# Altium footprint library Connector_SMD.PcbLib: 116 footprints (part 4 of 8)
Each footprint in its own frame and in the unit in brackets; x right, y up, seen from the top. Pads: shape width x height; smd on the part's side, far side on the other; paste and mask are expansions set on the pad; w line width, h text height; cw(c..) or ccw(c..) is an arc to the next point about the centre after c.
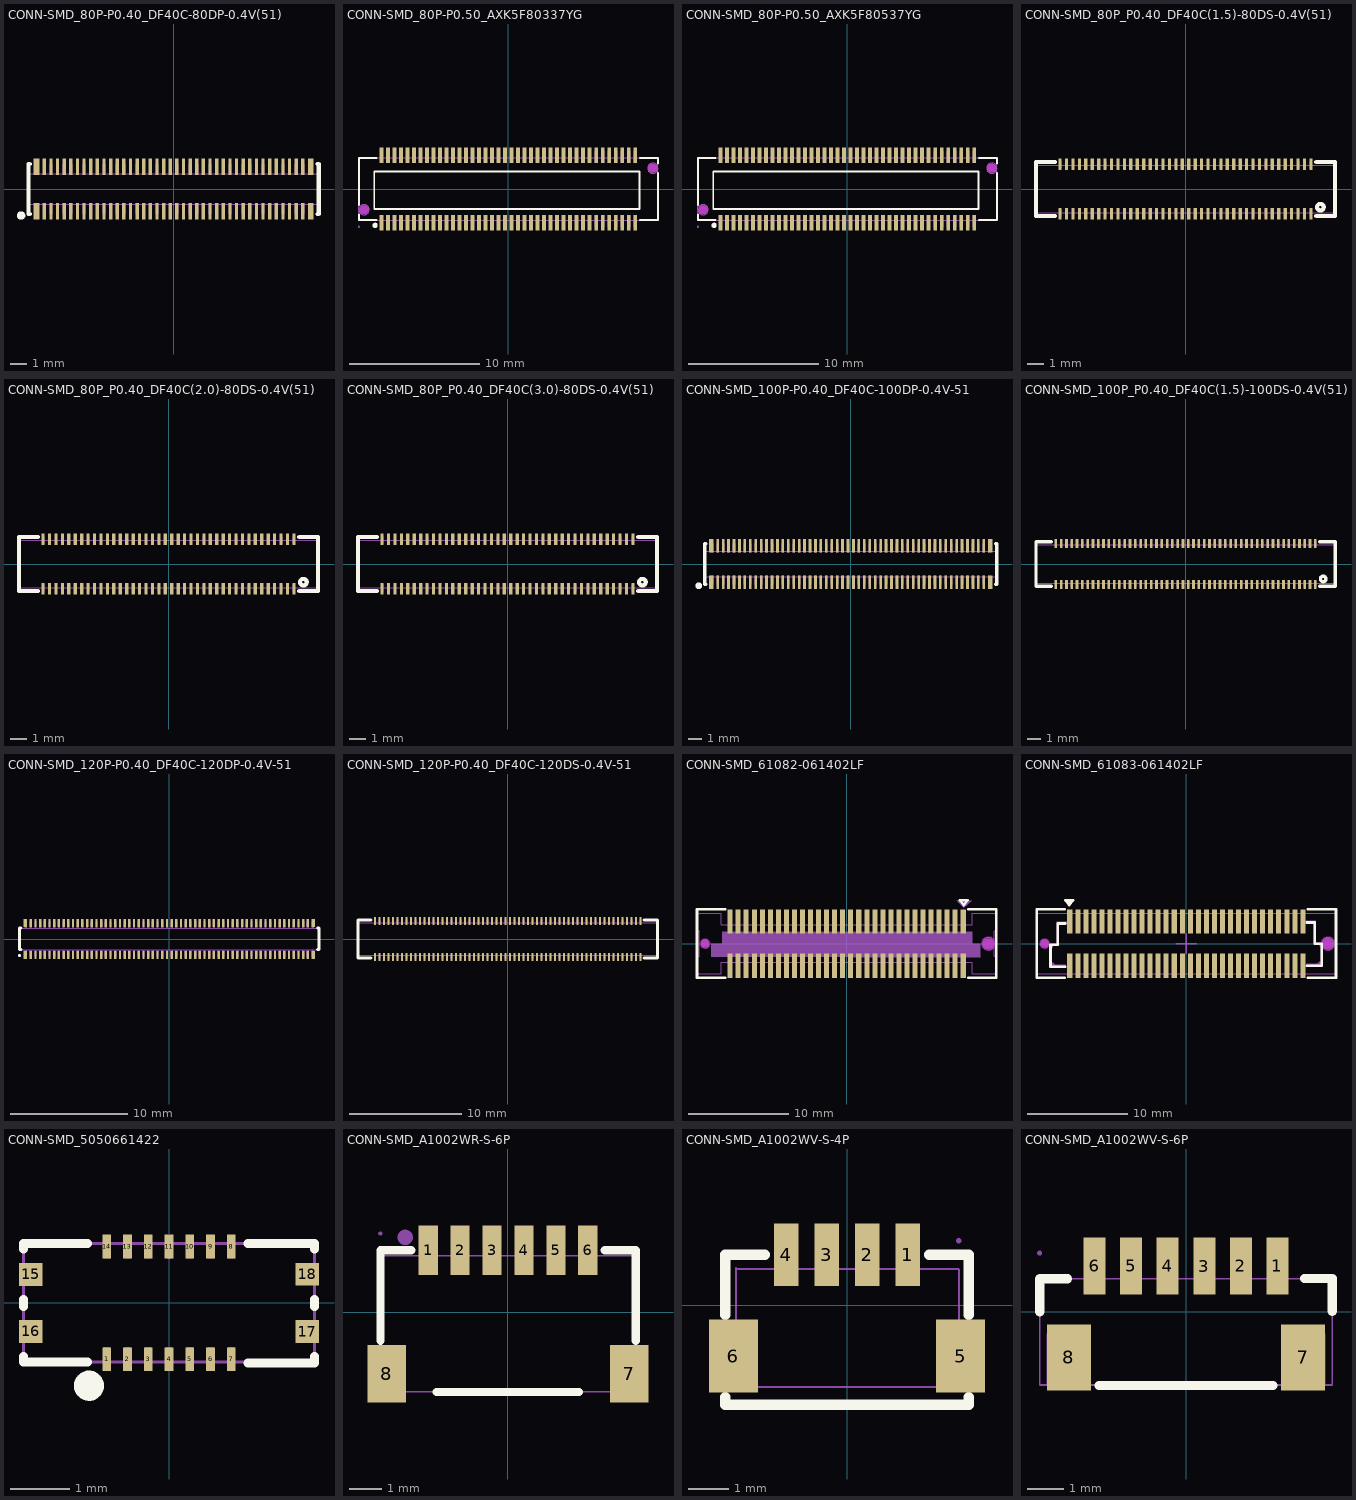
[diagram p3: the footprints below, top view; thin cyan lines are the x and y axes]

## CONN-SMD_80P-P0.40_DF40C-80DP-0.4V(51) [mm]
pads (84):
  rect 0.2x1 smd: 1(-7.8,-1.355) 2(-7.4,-1.355) 3(-7,-1.355) 4(-6.6,-1.355) 5(-6.2,-1.355) 6(-5.8,-1.355) 7(-5.4,-1.355) 8(-5,-1.355) 9(-4.6,-1.355) 10(-4.2,-1.355) 11(-3.8,-1.355) 12(-3.4,-1.355) 13(-3,-1.355) 14(-2.6,-1.355) 15(-2.2,-1.355) 16(-1.8,-1.355) 17(-1.4,-1.355) 18(-1,-1.355) 19(-0.6,-1.355) 20(-0.2,-1.355) 21(0.2,-1.355) 22(0.6,-1.355) 23(1,-1.355) 24(1.4,-1.355) 25(1.8,-1.355) 26(2.2,-1.355) 27(2.6,-1.355) 28(3,-1.355) 29(3.4,-1.355) 30(3.8,-1.355) 31(4.2,-1.355) 32(4.6,-1.355) 33(5,-1.355) 34(5.4,-1.355) 35(5.8,-1.355) 36(6.2,-1.355) 37(6.6,-1.355) 38(7,-1.355) 39(7.4,-1.355) 40(7.8,-1.355) 41(7.8,1.355) 42(7.4,1.355) 43(7,1.355) 44(6.6,1.355) 45(6.2,1.355) 46(5.8,1.355) 47(5.4,1.355) 48(5,1.355) 49(4.6,1.355) 50(4.2,1.355) 51(3.8,1.355) 52(3.4,1.355) 53(3,1.355) 54(2.6,1.355) 55(2.2,1.355) 56(1.8,1.355) 57(1.4,1.355) 58(1,1.355) 59(0.6,1.355) 60(0.2,1.355) 61(-0.2,1.355) 62(-0.6,1.355) 63(-1,1.355) 64(-1.4,1.355) 65(-1.8,1.355) 66(-2.2,1.355) 67(-2.6,1.355) 68(-3,1.355) 69(-3.4,1.355) 70(-3.8,1.355) 71(-4.2,1.355) 72(-4.6,1.355) 73(-5,1.355) 74(-5.4,1.355) 75(-5.8,1.355) 76(-6.2,1.355) 77(-6.6,1.355) 78(-7,1.355) 79(-7.4,1.355) 80(-7.8,1.355)
  rect 0.35x1 smd: 81(-8.275,1.355) 82(-8.275,-1.355) 83(8.275,-1.355) 84(8.275,1.355)
Top Overlay:
  circle w0.254: c-9.2,-1.6 r0.127
  lines w0.254: -8.681,-1.5 -8.76,-1.5 -8.76,1.5 -8.681,1.5 ; 8.681,-1.5 8.76,-1.5 8.76,1.5 8.681,1.5
Mechanical 15:
  drawing of 89 lines, arcs and shapes, not listed
3D body "CONN-SMD_DF40C-80DP-0.4V-51~CONN-SMD_DF40C-80DP-0.4V-51~5nDq.stp": height 1.24, standoff 0, extent -8.761,-1.485 8.761,1.485

## CONN-SMD_80P-P0.50_AXK5F80337YG [mm]
pads (80):
  rect 0.3x1.2 smd: 1(-9.75,-2.6) 2(-9.75,2.6) 3(-9.25,-2.6) 4(-9.25,2.6) 5(-8.75,-2.6) 6(-8.75,2.6) 7(-8.25,-2.6) 8(-8.25,2.6) 9(-7.75,-2.6) 10(-7.75,2.6) 11(-7.25,-2.6) 12(-7.25,2.6) 13(-6.75,-2.6) 14(-6.75,2.6) 15(-6.25,-2.6) 16(-6.25,2.6) 17(-5.75,-2.6) 18(-5.75,2.6) 19(-5.25,-2.6) 20(-5.25,2.6) 21(-4.75,-2.6) 22(-4.75,2.6) 23(-4.25,-2.6) 24(-4.25,2.6) 25(-3.75,-2.6) 26(-3.75,2.6) 27(-3.25,-2.6) 28(-3.25,2.6) 29(-2.75,-2.6) 30(-2.75,2.6) 31(-2.25,-2.6) 32(-2.25,2.6) 33(-1.75,-2.6) 34(-1.75,2.6) 35(-1.25,-2.6) 36(-1.25,2.6) 37(-0.75,-2.6) 38(-0.75,2.6) 39(-0.25,-2.6) 40(-0.25,2.6) 41(0.25,-2.6) 42(0.25,2.6) 43(0.75,-2.6) 44(0.75,2.6) 45(1.25,-2.6) 46(1.25,2.6) 47(1.75,-2.6) 48(1.75,2.6) 49(2.25,-2.6) 50(2.25,2.6) 51(2.75,-2.6) 52(2.75,2.6) 53(3.25,-2.6) 54(3.25,2.6) 55(3.75,-2.6) 56(3.75,2.6) 57(4.25,-2.6) 58(4.25,2.6) 59(4.75,-2.6) 60(4.75,2.6) 61(5.25,-2.6) 62(5.25,2.6) 63(5.75,-2.6) 64(5.75,2.6) 65(6.25,-2.6) 66(6.25,2.6) 67(6.75,-2.6) 68(6.75,2.6) 69(7.25,-2.6) 70(7.25,2.6) 71(7.75,-2.6) 72(7.75,2.6) 73(8.25,-2.6) 74(8.25,2.6) 75(8.75,-2.6) 76(8.75,2.6) 77(9.25,-2.6) 78(9.25,2.6) 79(9.75,-2.6) 80(9.75,2.6)
Top Overlay:
  circle w0.2: c-10.247,-2.794 r0.1
  lines w0.152: -11.5,-1.965 -11.5,-2.4 -10.131,-2.4 ; -11.5,-1.235 -11.5,2.4 -10.131,2.4 ; 10.131,-2.4 11.5,-2.4 11.5,1.235 ; 10.131,2.4 11.5,2.4 11.5,1.965 ; -10.31,-1.524 10.073,-1.524 10.073,1.333 -10.31,1.333 -10.31,-1.524
Keep-Out Layer:
  board cut-out: -10.7,-1.6 -10.701,-1.521 -10.762,-1.375 -10.875,-1.263 -11.021,-1.203 -11.179,-1.203 -11.326,-1.263 -11.438,-1.375 -11.499,-1.521 -11.5,-1.6 -11.499,-1.679 -11.438,-1.825 -11.326,-1.937 -11.179,-1.997 -11.021,-1.997 -10.874,-1.936 -10.762,-1.825 -10.701,-1.679 -10.7,-1.6
  board cut-out: 11.5,1.6 11.499,1.679 11.438,1.825 11.326,1.936 11.179,1.997 11.021,1.997 10.875,1.936 10.762,1.825 10.701,1.679 10.7,1.6 10.701,1.521 10.762,1.375 10.875,1.263 11.021,1.203 11.179,1.203 11.326,1.263 11.438,1.375 11.499,1.521 11.5,1.6
Mechanical 1:
  circle w0.005: c-11.1,-1.6 r0.4
  circle w0.005: c11.1,1.6 r0.4
Mechanical 6:
  circle w0.34: c11.1,1.6 r0.17
  circle w0.34: c-11.1,-1.6 r0.17
Mechanical 15:
  drawing of 85 lines, arcs and shapes, not listed
3D body "337.step": height 1.49, standoff 0, extent -11.5,-2.9 11.501,2.9

## CONN-SMD_80P-P0.50_AXK5F80537YG [mm]
pads (80):
  rect 0.3x1.2 smd: 1(-9.75,-2.6) 2(-9.75,2.6) 3(-9.25,-2.6) 4(-9.25,2.6) 5(-8.75,-2.6) 6(-8.75,2.6) 7(-8.25,-2.6) 8(-8.25,2.6) 9(-7.75,-2.6) 10(-7.75,2.6) 11(-7.25,-2.6) 12(-7.25,2.6) 13(-6.75,-2.6) 14(-6.75,2.6) 15(-6.25,-2.6) 16(-6.25,2.6) 17(-5.75,-2.6) 18(-5.75,2.6) 19(-5.25,-2.6) 20(-5.25,2.6) 21(-4.75,-2.6) 22(-4.75,2.6) 23(-4.25,-2.6) 24(-4.25,2.6) 25(-3.75,-2.6) 26(-3.75,2.6) 27(-3.25,-2.6) 28(-3.25,2.6) 29(-2.75,-2.6) 30(-2.75,2.6) 31(-2.25,-2.6) 32(-2.25,2.6) 33(-1.75,-2.6) 34(-1.75,2.6) 35(-1.25,-2.6) 36(-1.25,2.6) 37(-0.75,-2.6) 38(-0.75,2.6) 39(-0.25,-2.6) 40(-0.25,2.6) 41(0.25,-2.6) 42(0.25,2.6) 43(0.75,-2.6) 44(0.75,2.6) 45(1.25,-2.6) 46(1.25,2.6) 47(1.75,-2.6) 48(1.75,2.6) 49(2.25,-2.6) 50(2.25,2.6) 51(2.75,-2.6) 52(2.75,2.6) 53(3.25,-2.6) 54(3.25,2.6) 55(3.75,-2.6) 56(3.75,2.6) 57(4.25,-2.6) 58(4.25,2.6) 59(4.75,-2.6) 60(4.75,2.6) 61(5.25,-2.6) 62(5.25,2.6) 63(5.75,-2.6) 64(5.75,2.6) 65(6.25,-2.6) 66(6.25,2.6) 67(6.75,-2.6) 68(6.75,2.6) 69(7.25,-2.6) 70(7.25,2.6) 71(7.75,-2.6) 72(7.75,2.6) 73(8.25,-2.6) 74(8.25,2.6) 75(8.75,-2.6) 76(8.75,2.6) 77(9.25,-2.6) 78(9.25,2.6) 79(9.75,-2.6) 80(9.75,2.6)
Top Overlay:
  circle w0.2: c-10.247,-2.794 r0.1
  lines w0.152: -11.5,-1.965 -11.5,-2.4 -10.131,-2.4 ; -11.5,-1.235 -11.5,2.4 -10.131,2.4 ; 10.131,-2.4 11.5,-2.4 11.5,1.235 ; 10.131,2.4 11.5,2.4 11.5,1.965 ; -10.31,-1.524 10.073,-1.524 10.073,1.333 -10.31,1.333 -10.31,-1.524
Keep-Out Layer:
  board cut-out: -10.7,-1.6 -10.701,-1.521 -10.762,-1.375 -10.875,-1.263 -11.021,-1.203 -11.179,-1.203 -11.326,-1.263 -11.438,-1.375 -11.499,-1.521 -11.5,-1.6 -11.499,-1.679 -11.438,-1.825 -11.326,-1.937 -11.179,-1.997 -11.021,-1.997 -10.874,-1.936 -10.762,-1.825 -10.701,-1.679 -10.7,-1.6
  board cut-out: 11.5,1.6 11.499,1.679 11.438,1.825 11.326,1.936 11.179,1.997 11.021,1.997 10.875,1.936 10.762,1.825 10.701,1.679 10.7,1.6 10.701,1.521 10.762,1.375 10.875,1.263 11.021,1.203 11.179,1.203 11.326,1.263 11.438,1.375 11.499,1.521 11.5,1.6
Mechanical 1:
  circle w0.005: c-11.1,-1.6 r0.4
  circle w0.005: c11.1,1.6 r0.4
Mechanical 6:
  circle w0.34: c11.1,1.6 r0.17
  circle w0.34: c-11.1,-1.6 r0.17
Mechanical 15:
  drawing of 85 lines, arcs and shapes, not listed
3D body "537.step": height 1.87, standoff 0, extent -11.5,-2.9 11.501,2.9

## CONN-SMD_80P_P0.40_DF40C(1.5)-80DS-0.4V(51) [mm]
pads (80):
  rect 0.2x0.7 smd: 1(7.8,-1.54) 2(7.4,-1.54) 3(7,-1.54) 4(6.6,-1.54) 5(6.2,-1.54) 6(5.8,-1.54) 7(5.4,-1.54) 8(5,-1.54) 9(4.6,-1.54) 10(4.2,-1.54) 11(3.8,-1.54) 12(3.4,-1.54) 13(3,-1.54) 14(2.6,-1.54) 15(2.2,-1.54) 16(1.8,-1.54) 17(1.4,-1.54) 18(1,-1.54) 19(0.6,-1.54) 20(0.2,-1.54) 21(-0.2,-1.54) 22(-0.6,-1.54) 23(-1,-1.54) 24(-1.4,-1.54) 25(-1.8,-1.54) 26(-2.2,-1.54) 27(-2.6,-1.54) 28(-3,-1.54) 29(-3.4,-1.54) 30(-3.8,-1.54) 31(-4.2,-1.54) 32(-4.6,-1.54) 33(-5,-1.54) 34(-5.4,-1.54) 35(-5.8,-1.54) 36(-6.2,-1.54) 37(-6.6,-1.54) 38(-7,-1.54) 39(-7.4,-1.54) 40(-7.8,-1.54) 41(-7.8,1.54) 42(-7.4,1.54) 43(-7,1.54) 44(-6.6,1.54) 45(-6.2,1.54) 46(-5.8,1.54) 47(-5.4,1.54) 48(-5,1.54) 49(-4.6,1.54) 50(-4.2,1.54) 51(-3.8,1.54) 52(-3.4,1.54) 53(-3,1.54) 54(-2.6,1.54) 55(-2.2,1.54) 56(-1.8,1.54) 57(-1.4,1.54) 58(-1,1.54) 59(-0.6,1.54) 60(-0.2,1.54) 61(0.2,1.54) 62(0.6,1.54) 63(1,1.54) 64(1.4,1.54) 65(1.8,1.54) 66(2.2,1.54) 67(2.6,1.54) 68(3,1.54) 69(3.4,1.54) 70(3.8,1.54) 71(4.2,1.54) 72(4.6,1.54) 73(5,1.54) 74(5.4,1.54) 75(5.8,1.54) 76(6.2,1.54) 77(6.6,1.54) 78(7,1.54) 79(7.4,1.54) 80(7.8,1.54)
Top Overlay:
  circle w0.254: c8.391,-1.13 r0.207
  lines w0.254: -8.131,-1.69 -9.3,-1.69 -9.3,1.69 -8.131,1.69 ; 8.131,-1.69 9.3,-1.69 9.3,1.69 8.131,1.69
Mechanical 15:
  drawing of 85 lines, arcs and shapes, not listed
3D body "CN1.stp": height 1.45, standoff 0, extent -9.3,-1.69 9.3,1.69

## CONN-SMD_80P_P0.40_DF40C(2.0)-80DS-0.4V(51) [mm]
pads (80):
  rect 0.2x0.7 smd: 1(7.8,-1.54) 2(7.4,-1.54) 3(7,-1.54) 4(6.6,-1.54) 5(6.2,-1.54) 6(5.8,-1.54) 7(5.4,-1.54) 8(5,-1.54) 9(4.6,-1.54) 10(4.2,-1.54) 11(3.8,-1.54) 12(3.4,-1.54) 13(3,-1.54) 14(2.6,-1.54) 15(2.2,-1.54) 16(1.8,-1.54) 17(1.4,-1.54) 18(1,-1.54) 19(0.6,-1.54) 20(0.2,-1.54) 21(-0.2,-1.54) 22(-0.6,-1.54) 23(-1,-1.54) 24(-1.4,-1.54) 25(-1.8,-1.54) 26(-2.2,-1.54) 27(-2.6,-1.54) 28(-3,-1.54) 29(-3.4,-1.54) 30(-3.8,-1.54) 31(-4.2,-1.54) 32(-4.6,-1.54) 33(-5,-1.54) 34(-5.4,-1.54) 35(-5.8,-1.54) 36(-6.2,-1.54) 37(-6.6,-1.54) 38(-7,-1.54) 39(-7.4,-1.54) 40(-7.8,-1.54) 41(-7.8,1.54) 42(-7.4,1.54) 43(-7,1.54) 44(-6.6,1.54) 45(-6.2,1.54) 46(-5.8,1.54) 47(-5.4,1.54) 48(-5,1.54) 49(-4.6,1.54) 50(-4.2,1.54) 51(-3.8,1.54) 52(-3.4,1.54) 53(-3,1.54) 54(-2.6,1.54) 55(-2.2,1.54) 56(-1.8,1.54) 57(-1.4,1.54) 58(-1,1.54) 59(-0.6,1.54) 60(-0.2,1.54) 61(0.2,1.54) 62(0.6,1.54) 63(1,1.54) 64(1.4,1.54) 65(1.8,1.54) 66(2.2,1.54) 67(2.6,1.54) 68(3,1.54) 69(3.4,1.54) 70(3.8,1.54) 71(4.2,1.54) 72(4.6,1.54) 73(5,1.54) 74(5.4,1.54) 75(5.8,1.54) 76(6.2,1.54) 77(6.6,1.54) 78(7,1.54) 79(7.4,1.54) 80(7.8,1.54)
Top Overlay:
  circle w0.254: c8.391,-1.13 r0.207
  lines w0.254: -8.131,-1.69 -9.3,-1.69 -9.3,1.69 -8.131,1.69 ; 8.131,-1.69 9.3,-1.69 9.3,1.69 8.131,1.69
Mechanical 15:
  drawing of 85 lines, arcs and shapes, not listed
3D body "CN1.stp": height 1.45, standoff 0, extent -9.3,-1.69 9.3,1.69

## CONN-SMD_80P_P0.40_DF40C(3.0)-80DS-0.4V(51) [mm]
pads (80):
  rect 0.2x0.7 smd: 1(7.8,-1.54) 2(7.4,-1.54) 3(7,-1.54) 4(6.6,-1.54) 5(6.2,-1.54) 6(5.8,-1.54) 7(5.4,-1.54) 8(5,-1.54) 9(4.6,-1.54) 10(4.2,-1.54) 11(3.8,-1.54) 12(3.4,-1.54) 13(3,-1.54) 14(2.6,-1.54) 15(2.2,-1.54) 16(1.8,-1.54) 17(1.4,-1.54) 18(1,-1.54) 19(0.6,-1.54) 20(0.2,-1.54) 21(-0.2,-1.54) 22(-0.6,-1.54) 23(-1,-1.54) 24(-1.4,-1.54) 25(-1.8,-1.54) 26(-2.2,-1.54) 27(-2.6,-1.54) 28(-3,-1.54) 29(-3.4,-1.54) 30(-3.8,-1.54) 31(-4.2,-1.54) 32(-4.6,-1.54) 33(-5,-1.54) 34(-5.4,-1.54) 35(-5.8,-1.54) 36(-6.2,-1.54) 37(-6.6,-1.54) 38(-7,-1.54) 39(-7.4,-1.54) 40(-7.8,-1.54) 41(-7.8,1.54) 42(-7.4,1.54) 43(-7,1.54) 44(-6.6,1.54) 45(-6.2,1.54) 46(-5.8,1.54) 47(-5.4,1.54) 48(-5,1.54) 49(-4.6,1.54) 50(-4.2,1.54) 51(-3.8,1.54) 52(-3.4,1.54) 53(-3,1.54) 54(-2.6,1.54) 55(-2.2,1.54) 56(-1.8,1.54) 57(-1.4,1.54) 58(-1,1.54) 59(-0.6,1.54) 60(-0.2,1.54) 61(0.2,1.54) 62(0.6,1.54) 63(1,1.54) 64(1.4,1.54) 65(1.8,1.54) 66(2.2,1.54) 67(2.6,1.54) 68(3,1.54) 69(3.4,1.54) 70(3.8,1.54) 71(4.2,1.54) 72(4.6,1.54) 73(5,1.54) 74(5.4,1.54) 75(5.8,1.54) 76(6.2,1.54) 77(6.6,1.54) 78(7,1.54) 79(7.4,1.54) 80(7.8,1.54)
Top Overlay:
  circle w0.254: c8.391,-1.13 r0.207
  lines w0.254: -8.131,-1.69 -9.3,-1.69 -9.3,1.69 -8.131,1.69 ; 8.131,-1.69 9.3,-1.69 9.3,1.69 8.131,1.69
Mechanical 15:
  drawing of 85 lines, arcs and shapes, not listed
3D body "CN1.stp": height 1.45, standoff 0, extent -9.3,-1.69 9.3,1.69

## CONN-SMD_100P-P0.40_DF40C-100DP-0.4V-51 [mm]
pads (104):
  rect 0.2x1 smd: 1(-9.8,-1.355) 2(-9.4,-1.355) 3(-9,-1.355) 4(-8.6,-1.355) 5(-8.2,-1.355) 6(-7.8,-1.355) 7(-7.4,-1.355) 8(-7,-1.355) 9(-6.6,-1.355) 10(-6.2,-1.355) 11(-5.8,-1.355) 12(-5.4,-1.355) 13(-5,-1.355) 14(-4.6,-1.355) 15(-4.2,-1.355) 16(-3.8,-1.355) 17(-3.4,-1.355) 18(-3,-1.355) 19(-2.6,-1.355) 20(-2.2,-1.355) 21(-1.8,-1.355) 22(-1.4,-1.355) 23(-1,-1.355) 24(-0.6,-1.355) 25(-0.2,-1.355) 26(0.2,-1.355) 27(0.6,-1.355) 28(1,-1.355) 29(1.4,-1.355) 30(1.8,-1.355) 31(2.2,-1.355) 32(2.6,-1.355) 33(3,-1.355) 34(3.4,-1.355) 35(3.8,-1.355) 36(4.2,-1.355) 37(4.6,-1.355) 38(5,-1.355) 39(5.4,-1.355) 40(5.8,-1.355) 41(6.2,-1.355) 42(6.6,-1.355) 43(7,-1.355) 44(7.4,-1.355) 45(7.8,-1.355) 46(8.2,-1.355) 47(8.6,-1.355) 48(9,-1.355) 49(9.4,-1.355) 50(9.8,-1.355) 51(9.8,1.355) 52(9.4,1.355) 53(9,1.355) 54(8.6,1.355) 55(8.2,1.355) 56(7.8,1.355) 57(7.4,1.355) 58(7,1.355) 59(6.6,1.355) 60(6.2,1.355) 61(5.8,1.355) 62(5.4,1.355) 63(5,1.355) 64(4.6,1.355) 65(4.2,1.355) 66(3.8,1.355) 67(3.4,1.355) 68(3,1.355) 69(2.6,1.355) 70(2.2,1.355) 71(1.8,1.355) 72(1.4,1.355) 73(1,1.355) 74(0.6,1.355) 75(0.2,1.355) 76(-0.2,1.355) 77(-0.6,1.355) 78(-1,1.355) 79(-1.4,1.355) 80(-1.8,1.355) 81(-2.2,1.355) 82(-2.6,1.355) 83(-3,1.355) 84(-3.4,1.355) 85(-3.8,1.355) 86(-4.2,1.355) 87(-4.6,1.355) 88(-5,1.355) 89(-5.4,1.355) 90(-5.8,1.355) 91(-6.2,1.355) 92(-6.6,1.355) 93(-7,1.355) 94(-7.4,1.355) 95(-7.8,1.355) 96(-8.2,1.355) 97(-8.6,1.355) 98(-9,1.355) 99(-9.4,1.355) 100(-9.8,1.355)
  rect 0.35x1 smd: 101(-10.275,1.355) 102(-10.275,-1.355) 103(10.275,-1.355) 104(10.275,1.355)
Top Overlay:
  circle w0.254: c-11.2,-1.6 r0.127
  lines w0.254: -10.681,-1.5 -10.76,-1.5 -10.76,1.5 -10.681,1.5 ; 10.681,-1.5 10.76,-1.5 10.76,1.5 10.681,1.5
Mechanical 15:
  drawing of 109 lines, arcs and shapes, not listed
3D body "1.step": height 1.14, standoff 0, extent -10.76,-1.485 10.76,1.485

## CONN-SMD_100P_P0.40_DF40C(1.5)-100DS-0.4V(51) [mm]
pads (100):
  rect 0.2x0.7 smd: 1(9.8,-1.54) 2(9.4,-1.54) 3(8.999,-1.54) 4(8.6,-1.54) 5(8.2,-1.54) 6(7.8,-1.54) 7(7.4,-1.54) 8(6.999,-1.54) 9(6.6,-1.54) 10(6.2,-1.54) 11(5.8,-1.54) 12(5.4,-1.54) 13(4.999,-1.54) 14(4.6,-1.54) 15(4.2,-1.54) 16(3.8,-1.54) 17(3.4,-1.54) 18(2.999,-1.54) 19(2.6,-1.54) 20(2.2,-1.54) 21(1.8,-1.54) 22(1.4,-1.54) 23(0.999,-1.54) 24(0.6,-1.54) 25(0.2,-1.54) 26(-0.2,-1.54) 27(-0.6,-1.54) 28(-1.001,-1.54) 29(-1.4,-1.54) 30(-1.8,-1.54) 31(-2.2,-1.54) 32(-2.6,-1.54) 33(-3.001,-1.54) 34(-3.4,-1.54) 35(-3.8,-1.54) 36(-4.2,-1.54) 37(-4.6,-1.54) 38(-5,-1.54) 39(-5.4,-1.54) 40(-5.8,-1.54) 41(-6.2,-1.54) 42(-6.6,-1.54) 43(-7,-1.54) 44(-7.4,-1.54) 45(-7.8,-1.54) 46(-8.2,-1.54) 47(-8.6,-1.54) 48(-9,-1.54) 49(-9.4,-1.54) 50(-9.8,-1.54) 51(-9.8,1.54) 52(-9.4,1.54) 53(-9,1.54) 54(-8.6,1.54) 55(-8.2,1.54) 56(-7.8,1.54) 57(-7.4,1.54) 58(-7,1.54) 59(-6.6,1.54) 60(-6.2,1.54) 61(-5.8,1.54) 62(-5.4,1.54) 63(-5,1.54) 64(-4.6,1.54) 65(-4.2,1.54) 66(-3.8,1.54) 67(-3.4,1.54) 68(-3,1.54) 69(-2.6,1.54) 70(-2.2,1.54) 71(-1.8,1.54) 72(-1.4,1.54) 73(-1,1.54) 74(-0.6,1.54) 75(-0.2,1.54) 76(0.2,1.54) 77(0.6,1.54) 78(1,1.54) 79(1.4,1.54) 80(1.8,1.54) 81(2.2,1.54) 82(2.6,1.54) 83(3,1.54) 84(3.4,1.54) 85(3.8,1.54) 86(4.2,1.54) 87(4.6,1.54) 88(5,1.54) 89(5.4,1.54) 90(5.8,1.54) 91(6.2,1.54) 92(6.6,1.54) 93(7,1.54) 94(7.4,1.54) 95(7.8,1.54) 96(8.2,1.54) 97(8.6,1.54) 98(9,1.54) 99(9.4,1.54) 100(9.8,1.54)
Top Overlay:
  circle w0.254: c10.391,-1.13 r0.207
  lines w0.254: -10.132,-1.69 -11.3,-1.69 -11.3,1.69 -10.132,1.69 ; 10.131,-1.69 11.3,-1.69 11.3,1.69 10.131,1.69
Mechanical 15:
  drawing of 105 lines, arcs and shapes, not listed
3D body "DF40C-100DS.stp": height 1.4, standoff -0.05, extent -11.3,-1.69 11.3,1.69

## CONN-SMD_120P-P0.40_DF40C-120DP-0.4V-51 [mm]
pads (124):
  rect 0.2x0.66 smd paste+0 mask+0.05: 1(-11.8,-1.355) 2(-11.8,1.355) 3(-11.4,-1.355) 4(-11.4,1.355) 5(-11,-1.355) 6(-11,1.355) 7(-10.6,-1.355) 8(-10.6,1.355) 9(-10.2,-1.355) 10(-10.2,1.355) 11(-9.8,-1.355) 12(-9.8,1.355) 13(-9.4,-1.355) 14(-9.4,1.355) 15(-9,-1.355) 16(-9,1.355) 17(-8.6,-1.355) 18(-8.6,1.355) 19(-8.2,-1.355) 20(-8.2,1.355) 21(-7.8,-1.355) 22(-7.8,1.355) 23(-7.4,-1.355) 24(-7.4,1.355) 25(-7,-1.355) 26(-7,1.355) 27(-6.6,-1.355) 28(-6.6,1.355) 29(-6.2,-1.355) 30(-6.2,1.355) 31(-5.8,-1.355) 32(-5.8,1.355) 33(-5.4,-1.355) 34(-5.4,1.355) 35(-5,-1.355) 36(-5,1.355) 37(-4.6,-1.355) 38(-4.6,1.355) 39(-4.2,-1.355) 40(-4.2,1.355) 41(-3.8,-1.355) 42(-3.8,1.355) 43(-3.4,-1.355) 44(-3.4,1.355) 45(-3,-1.355) 46(-3,1.355) 47(-2.6,-1.355) 48(-2.6,1.355) 49(-2.2,-1.355) 50(-2.2,1.355) 51(-1.8,-1.355) 52(-1.8,1.355) 53(-1.4,-1.355) 54(-1.4,1.355) 55(-1,-1.355) 56(-1,1.355) 57(-0.6,-1.355) 58(-0.6,1.355) 59(-0.2,-1.355) 60(-0.2,1.355) 61(0.2,-1.355) 62(0.2,1.355) 63(0.6,-1.355) 64(0.6,1.355) 65(1,-1.355) 66(1,1.355) 67(1.4,-1.355) 68(1.4,1.355) 69(1.8,-1.355) 70(1.8,1.355) 71(2.2,-1.355) 72(2.2,1.355) 73(2.6,-1.355) 74(2.6,1.355) 75(3,-1.355) 76(3,1.355) 77(3.4,-1.355) 78(3.4,1.355) 79(3.8,-1.355) 80(3.8,1.355) 81(4.2,-1.355) 82(4.2,1.355) 83(4.6,-1.355) 84(4.6,1.355) 85(5,-1.355) 86(5,1.355) 87(5.4,-1.355) 88(5.4,1.355) 89(5.8,-1.355) 90(5.8,1.355) 91(6.2,-1.355) 92(6.2,1.355) 93(6.6,-1.355) 94(6.6,1.355) 95(7,-1.355) 96(7,1.355) 97(7.4,-1.355) 98(7.4,1.355) 99(7.8,-1.355) 100(7.8,1.355) 101(8.2,-1.355) 102(8.2,1.355) 103(8.6,-1.355) 104(8.6,1.355) 105(9,-1.355) 106(9,1.355) 107(9.4,-1.355) 108(9.4,1.355) 109(9.8,-1.355) 110(9.8,1.355) 111(10.2,-1.355) 112(10.2,1.355) 113(10.6,-1.355) 114(10.6,1.355) 115(11,-1.355) 116(11,1.355) 117(11.4,-1.355) 118(11.4,1.355) 119(11.8,-1.355) 120(11.8,1.355)
  rect 0.3x0.66 smd paste+0 mask+0.05: 121(12.265,-1.355) 122(12.265,1.355) 123(-12.265,-1.355) 124(-12.265,1.355)
Top Overlay:
  circle w0.16: c-12.75,-1.397 r0.049
  lines w0.254: -12.634,0.95 -12.75,0.95 -12.75,-0.9 -12.609,-0.9 ; 12.609,-0.9 12.75,-0.9 12.75,0.9 ; 12.634,0.95 12.75,0.95
Mechanical 6:
  lines w0.051: -12.75,-0.925 12.75,-0.925 12.75,0.925 -12.75,0.925 -12.75,-0.925
Mechanical 7:
  drawing of 124 lines, arcs and shapes, not listed
Mechanical 9:
  drawing of 124 lines, arcs and shapes, not listed

## CONN-SMD_120P-P0.40_DF40C-120DS-0.4V-51 [mm]
pads (120):
  rect 0.2x0.7 smd paste+0.051: 1(11.8,-1.6) 2(11.4,-1.6) 3(11,-1.6) 4(10.6,-1.6) 5(10.2,-1.6) 6(9.8,-1.6) 7(9.4,-1.6) 8(9,-1.6) 9(8.6,-1.6) 10(8.2,-1.6) 11(7.8,-1.6) 12(7.4,-1.6) 13(7,-1.6) 14(6.6,-1.6) 15(6.2,-1.6) 16(5.8,-1.6) 17(5.4,-1.6) 18(5,-1.6) 19(4.6,-1.6) 20(4.2,-1.6) 21(3.8,-1.6) 22(3.4,-1.6) 23(3,-1.6) 24(2.6,-1.6) 25(2.2,-1.6) 26(1.8,-1.6) 27(1.4,-1.6) 28(1,-1.6) 29(0.6,-1.6) 30(0.2,-1.6) 31(-0.2,-1.6) 32(-0.6,-1.6) 33(-1,-1.6) 34(-1.4,-1.6) 35(-1.8,-1.6) 36(-2.2,-1.6) 37(-2.6,-1.6) 38(-3,-1.6) 39(-3.4,-1.6) 40(-3.8,-1.6) 41(-4.2,-1.6) 42(-4.6,-1.6) 43(-5,-1.6) 44(-5.4,-1.6) 45(-5.8,-1.6) 46(-6.2,-1.6) 47(-6.6,-1.6) 48(-7,-1.6) 49(-7.4,-1.6) 50(-7.8,-1.6) 51(-8.2,-1.6) 52(-8.6,-1.6) 53(-9,-1.6) 54(-9.4,-1.6) 55(-9.8,-1.6) 56(-10.2,-1.6) 57(-10.6,-1.6) 58(-11,-1.6) 59(-11.4,-1.6) 60(-11.8,-1.6) 61(-11.8,1.6) 62(-11.4,1.6) 63(-11,1.6) 64(-10.6,1.6) 65(-10.2,1.6) 66(-9.8,1.6) 67(-9.4,1.6) 68(-9,1.6) 69(-8.6,1.6) 70(-8.2,1.6) 71(-7.8,1.6) 72(-7.4,1.6) 73(-7,1.6) 74(-6.6,1.6) 75(-6.2,1.6) 76(-5.8,1.6) 77(-5.4,1.6) 78(-5,1.6) 79(-4.6,1.6) 80(-4.2,1.6) 81(-3.8,1.6) 82(-3.4,1.6) 83(-3,1.6) 84(-2.6,1.6) 85(-2.2,1.6) 86(-1.8,1.6) 87(-1.4,1.6) 88(-1,1.6) 89(-0.6,1.6) 90(-0.2,1.6) 91(0.2,1.6) 92(0.6,1.6) 93(1,1.6) 94(1.4,1.6) 95(1.8,1.6) 96(2.2,1.6) 97(2.6,1.6) 98(3,1.6) 99(3.4,1.6) 100(3.8,1.6) 101(4.2,1.6) 102(4.6,1.6) 103(5,1.6) 104(5.4,1.6) 105(5.8,1.6) 106(6.2,1.6) 107(6.6,1.6) 108(7,1.6) 109(7.4,1.6) 110(7.8,1.6) 111(8.2,1.6) 112(8.6,1.6) 113(9,1.6) 114(9.4,1.6) 115(9.8,1.6) 116(10.2,1.6) 117(10.6,1.6) 118(11,1.6) 119(11.4,1.6) 120(11.8,1.6)
Top Overlay:
  lines w0.254: -12.131,-1.69 -13.3,-1.69 -13.3,1.69 -12.131,1.69 ; 12.131,-1.69 13.3,-1.69 13.3,1.69 12.131,1.69
Mechanical 6:
  lines w0.051: -13.3,-1.44 -13.3,1.44 13.3,1.44 13.3,-1.44 -13.3,-1.44
Mechanical 8:
  region: 13.36,-1.69 13.36,-1.715 13.325,-1.75 13.275,-1.75 13.24,-1.715 13.24,-1.69 13.24,-1.665 13.275,-1.63 13.325,-1.63 13.36,-1.665 13.36,-1.69
Mechanical 9:
  drawing of 120 lines, arcs and shapes, not listed
3D body "123123.step": height 1.4, standoff -0.05, extent -13.305,-1.68 13.305,1.7

## CONN-SMD_61082-061402LF [mm]
pads (60):
  rect 0.5x2.4 smd: 1(11.6,2.2) 2(11.6,-2.2) 3(10.8,2.2) 4(10.8,-2.2) 5(10,2.2) 6(10,-2.2) 7(9.2,2.2) 8(9.2,-2.2) 9(8.4,2.2) 10(8.4,-2.2) 11(7.6,2.2) 12(7.6,-2.2) 13(6.8,2.2) 14(6.8,-2.2) 15(6,2.2) 16(6,-2.2) 17(5.2,2.2) 18(5.2,-2.2) 19(4.4,2.2) 20(4.4,-2.2) 21(3.6,2.2) 22(3.6,-2.2) 23(2.8,2.2) 24(2.8,-2.2) 25(2,2.2) 26(2,-2.2) 27(1.2,2.2) 28(1.2,-2.2) 29(0.4,2.2) 30(0.4,-2.2) 31(-0.4,2.2) 32(-0.4,-2.2) 33(-1.2,2.2) 34(-1.2,-2.2) 35(-2,2.2) 36(-2,-2.2) 37(-2.8,2.2) 38(-2.8,-2.2) 39(-3.6,2.2) 40(-3.6,-2.2) 41(-4.4,2.2) 42(-4.4,-2.2) 43(-5.2,2.2) 44(-5.2,-2.2) 45(-6,2.2) 46(-6,-2.2) 47(-6.8,2.2) 48(-6.8,-2.2) 49(-7.6,2.2) 50(-7.6,-2.2) 51(-8.4,2.2) 52(-8.4,-2.2) 53(-9.2,2.2) 54(-9.2,-2.2) 55(-10,2.2) 56(-10,-2.2) 57(-10.8,2.2) 58(-10.8,-2.2) 59(-11.6,2.2) 60(-11.6,-2.2)
Top Overlay:
  lines w0.254: -12.081,-3.4 -14.9,-3.4 -14.9,3.4 -12.081,3.4 ; 12.081,-3.4 14.9,-3.4 14.9,3.4 12.081,3.4 ; 11.239,4.318 11.659,3.836 12.039,4.318 11.239,4.318
Keep-Out Layer:
  board cut-out: -13.7,0 -13.7,0.079 -13.761,0.226 -13.873,0.339 -14.02,0.4 -14.18,0.4 -14.327,0.339 -14.439,0.226 -14.5,0.079 -14.5,0 -14.5,-0.08 -14.439,-0.227 -14.326,-0.339 -14.179,-0.4 -14.02,-0.4 -13.873,-0.339 -13.761,-0.227 -13.7,-0.08 -13.7,0
  board cut-out: 14.7,0 14.699,0.118 14.606,0.336 14.437,0.502 14.219,0.592 13.982,0.592 13.763,0.502 13.594,0.336 13.502,0.118 13.5,0 13.502,-0.119 13.595,-0.336 13.763,-0.503 13.982,-0.592 14.219,-0.592 14.438,-0.502 14.606,-0.336 14.699,-0.118 14.7,0
Keep-Out Layer:
  circle w0.254: c-14.1,0 r0.4
  circle w0.025: c-14.1,0 r0.4
  circle w0.254: c14.1,0 r0.6
  circle w0.025: c14.1,0 r0.6
Mechanical 1:
  circle w0.025: c-14.1,0 r0.4
  circle w0.025: c14.1,0 r0.6
Mechanical 6:
  circle w0.53: c14.1,0 r0.265
  circle w0.35: c-14.1,0 r0.175
  region: -12.2,-1.3 -13.5,-1.3 -13.5,0 -12.4,0 -12.4,1.2 12.5,1.2 12.5,0 13.3,0 13.3,-1.4
  region: 10.95,4.25 12.45,4.25 11.65,3.55
Mechanical 15:
  drawing of 124 lines, arcs and shapes, not listed
3D body "1111111.stp": height 3.7, standoff -0.7, extent -14.9,-3 14.9,3

## CONN-SMD_61083-061402LF [mm]
pads (60):
  rect 0.5x2.4 smd: 1(-11.6,2.2) 2(-11.6,-2.2) 3(-10.8,2.2) 4(-10.8,-2.2) 5(-10,2.2) 6(-10,-2.2) 7(-9.2,2.2) 8(-9.2,-2.2) 9(-8.4,2.2) 10(-8.4,-2.2) 11(-7.6,2.2) 12(-7.6,-2.2) 13(-6.8,2.2) 14(-6.8,-2.2) 15(-6,2.2) 16(-6,-2.2) 17(-5.2,2.2) 18(-5.2,-2.2) 19(-4.4,2.2) 20(-4.4,-2.2) 21(-3.6,2.2) 22(-3.6,-2.2) 23(-2.8,2.2) 24(-2.8,-2.2) 25(-2,2.2) 26(-2,-2.2) 27(-1.2,2.2) 28(-1.2,-2.2) 29(-0.4,2.2) 30(-0.4,-2.2) 31(0.4,2.2) 32(0.4,-2.2) 33(1.2,2.2) 34(1.2,-2.2) 35(2,2.2) 36(2,-2.2) 37(2.8,2.2) 38(2.8,-2.2) 39(3.6,2.2) 40(3.6,-2.2) 41(4.4,2.2) 42(4.4,-2.2) 43(5.2,2.2) 44(5.2,-2.2) 45(6,2.2) 46(6,-2.2) 47(6.8,2.2) 48(6.8,-2.2) 49(7.6,2.2) 50(7.6,-2.2) 51(8.4,2.2) 52(8.4,-2.2) 53(9.2,2.2) 54(9.2,-2.2) 55(10,2.2) 56(10,-2.2) 57(10.8,2.2) 58(10.8,-2.2) 59(11.6,2.2) 60(11.6,-2.2)
Top Overlay:
  region: -11.239,4.318 -12.039,4.318 -12.039,4.216 -11.659,3.836
  lines w0.254: -12.081,-3.4 -14.9,-3.4 -14.9,3.4 -12.081,3.4 ; -12.031,-2.3 -13.515,-2.3 -13.515,-0.1 -12.8,-0.1 -12.8,2 -12.031,2 ; 12,-2.2 13.484,-2.2 13.484,0 12.769,0 12.769,2.1 12,2.1 ; 12.081,-3.4 14.9,-3.4 14.9,3.4 12.081,3.4 ; -12.039,4.318 -11.659,3.836 -11.239,4.318 -12.039,4.318
Keep-Out Layer:
  board cut-out: 14.7,0 14.699,0.119 14.607,0.338 14.439,0.505 14.219,0.596 13.981,0.596 13.762,0.505 13.593,0.338 13.501,0.119 13.5,0 13.501,-0.119 13.593,-0.338 13.762,-0.506 13.981,-0.596 14.219,-0.596 14.439,-0.506 14.607,-0.338 14.699,-0.119 14.7,0
  board cut-out: -13.7,0 -13.7,0.079 -13.761,0.226 -13.873,0.339 -14.02,0.4 -14.18,0.4 -14.327,0.339 -14.439,0.226 -14.5,0.079 -14.5,0 -14.5,-0.08 -14.439,-0.227 -14.327,-0.339 -14.179,-0.4 -14.02,-0.4 -13.873,-0.339 -13.761,-0.227 -13.7,-0.08 -13.7,0
Keep-Out Layer:
  circle w0.254: c14.1,0 r0.6
  circle w0.025: c14.1,0 r0.6
  circle w0.254: c-14.1,0 r0.4
  circle w0.025: c-14.1,0 r0.4
Mechanical 1:
  circle w0.025: c14.1,0 r0.6
  circle w0.025: c-14.1,0 r0.4
Mechanical 6:
  circle w0.55: c14.1,0 r0.275
  circle w0.35: c-14.1,0 r0.175
  region: 11.9,2.3 12.9,2.3 12.9,0.1 13.6,0.1 13.6,-2.2 12,-2.2 12,-2.1 12,-2 13.2,-2 13.4,-2 13.4,-0.2 13.4,-0.1 12.7,-0.1 12.7,2.1 11.9,2.1
  region: -11.9,2.2 -12.9,2.2 -12.9,0 -13.6,0 -13.6,-2.3 -12,-2.3 -12,-2.2 -12,-2.1 -13.2,-2.1 -13.4,-2.1 -13.4,-0.3 -13.4,-0.2 -12.7,-0.2 -12.7,2 -11.9,2
  region: -12.039,4.318 -11.239,4.318 -11.659,3.836
  lines w0.254: -13.5,-0.2 -13.4,-0.3 ; -13.3,-2 -13.2,-2.1 ; 13.2,-2 13.3,-1.9 ; 13.4,-0.2 13.5,-0.1
Mechanical 15:
  drawing of 67 lines, arcs and shapes, not listed
3D body "111.stp": height 4.7, standoff -0.7, extent -14.9,-3 14.9,3

## CONN-SMD_5050661422 [mm]
pads (18):
  rect 0.15x0.4 smd paste+0 mask+0.05: 1(-1.05,-0.95) 2(-0.7,-0.95) 3(-0.35,-0.95) 4(0,-0.95) 5(0.35,-0.95) 6(0.7,-0.95) 7(1.05,-0.95) 8(1.05,0.95) 9(0.7,0.95) 10(0.35,0.95) 11(0,0.95) 12(-0.35,0.95) 13(-0.7,0.95) 14(-1.05,0.95)
  rect 0.4x0.385 smd paste+0 mask+0.05: 15(-2.33,0.482) 16(-2.33,-0.482) 17(2.33,-0.483) 18(2.33,0.482)
Top Overlay:
  circle w0.254: c-1.349,-1.397 r0.127
  lines w0.152: -2.45,-0.906 -2.45,-1 -1.371,-1 ; -2.45,-0.058 -2.45,0.058 ; -2.45,0.906 -2.45,1 -1.371,1 ; 1.329,-1.016 2.45,-1.016 2.45,-0.906 ; 1.329,1 2.45,1 2.45,0.906 ; 2.45,-0.059 2.45,0.059
Mechanical 6:
  lines w0.051: -2.45,-1 -2.45,1 2.45,1 2.45,-1 -2.45,-1
Mechanical 8:
  region: -2.39,-1 -2.39,-1.025 -2.425,-1.06 -2.475,-1.06 -2.51,-1.025 -2.51,-1 -2.51,-0.975 -2.475,-0.94 -2.425,-0.94 -2.39,-0.975 -2.39,-1
Mechanical 9:
  region: -2.23,0.594 -2.23,0.369 -2.45,0.369 -2.45,0.594
  region: -2.45,-0.595 -2.45,-0.37 -2.23,-0.37 -2.23,-0.595
  region: -1.1,1 -1,1 -1,0.75 -1.1,0.75
  region: -0.75,1 -0.65,1 -0.65,0.75 -0.75,0.75
  region: -0.4,1 -0.3,1 -0.3,0.75 -0.4,0.75
  region: -0.05,1 0.05,1 0.05,0.75 -0.05,0.75
  region: 0.3,1 0.4,1 0.4,0.75 0.3,0.75
  region: 0.65,1 0.75,1 0.75,0.75 0.65,0.75
  region: 1,1 1.1,1 1.1,0.75 1,0.75
  region: 1,-0.75 1.1,-0.75 1.1,-1 1,-1
  region: 0.65,-0.75 0.75,-0.75 0.75,-1 0.65,-1
  region: 0.3,-0.75 0.4,-0.75 0.4,-1 0.3,-1
  region: -0.05,-0.75 0.05,-0.75 0.05,-1 -0.05,-1
  region: -0.4,-0.75 -0.3,-0.75 -0.3,-1 -0.4,-1
  region: -0.75,-0.75 -0.65,-0.75 -0.65,-1 -0.75,-1
  region: -1.1,-0.75 -1,-0.75 -1,-1 -1.1,-1
  region: 2.23,0.37 2.23,0.595 2.45,0.595 2.45,0.37
  region: 2.23,-0.595 2.23,-0.37 2.45,-0.37 2.45,-0.595
3D body "123.step": height 0.56, standoff -0.02, extent -2.45,-1 2.45,1.01

## CONN-SMD_A1002WR-S-6P [mm]
pads (8):
  rect 0.6x1.55 smd paste+0 mask+0.051: 1(-2.5,1.939) 2(-1.5,1.939) 3(-0.498,1.936) 4(0.501,1.937) 5(1.502,1.937) 6(2.502,1.937)
  rect 1.2x1.8 smd paste+0 mask+0.051: 7(3.801,-1.939) 8(-3.801,-1.937)
Top Overlay:
  lines w0.254: -3.998,-0.899 -3.998,1.935 -3.032,1.935 ; -2.238,-2.507 2.222,-2.507 ; 3.033,1.935 4.003,1.935 4.003,-0.902
Mechanical 6:
  circle w0.24: c-3.22,2.34 r0.12
Mechanical 15:
  region: -3.94,2.46 -3.94,2.485 -3.975,2.52 -4.025,2.52 -4.06,2.485 -4.06,2.46 -4.06,2.435 -4.025,2.4 -3.975,2.4 -3.94,2.435 -3.94,2.46
  region: 2.602,1.66 2.402,1.66 2.402,2.46 2.602,2.46
  region: 1.602,1.66 1.402,1.66 1.402,2.46 1.602,2.46
  region: 0.601,1.66 0.401,1.66 0.401,2.46 0.601,2.46
  region: -0.398,1.66 -0.598,1.66 -0.598,2.46 -0.398,2.46
  region: -1.4,1.66 -1.6,1.66 -1.6,2.46 -1.4,2.46
  region: -2.4,1.66 -2.6,1.66 -2.6,2.46 -2.4,2.46
  region: 3.701,-1.439 3.901,-1.439 3.901,-2.439 3.701,-2.439
  region: -3.901,-1.437 -3.701,-1.437 -3.701,-2.437 -3.901,-2.437
  lines w0.051: -4,-2.5 -4,1.76 4,1.76 4,-2.5 -4,-2.5
3D body "CN1.stp": height 2.45, standoff 0, extent -3.748,-2.587 3.752,2.413

## CONN-SMD_A1002WV-S-4P [mm]
pads (6):
  rect 0.6x1.55 smd paste+0 mask+0.051: 1(1.5,1.251) 2(0.5,1.251) 3(-0.498,1.249) 4(-1.5,1.251)
  rect 1.2x1.8 smd paste+0 mask+0.051: 5(2.8,-1.251) 6(-2.8,-1.251)
Top Overlay:
  lines w0.254: -3.002,-2.264 -3.002,-2.451 3.002,-2.451 3.002,-2.264 ; -3.002,-0.237 -3.002,1.249 -2.031,1.249 ; 2.031,1.249 3.002,1.249 3.002,-0.237
Mechanical 15:
  region: 2.82,1.59 2.82,1.615 2.785,1.65 2.735,1.65 2.7,1.615 2.7,1.59 2.7,1.565 2.735,1.53 2.785,1.53 2.82,1.565 2.82,1.59
  region: -1.6,1.59 -1.4,1.59 -1.4,0.74 -1.6,0.74
  region: -0.598,1.59 -0.398,1.59 -0.398,0.74 -0.598,0.74
  region: 0.4,1.59 0.6,1.59 0.6,0.74 0.4,0.74
  region: 1.4,1.59 1.6,1.59 1.6,0.74 1.4,0.74
  region: 2.46,-0.751 2.76,-0.751 2.76,-1.751 2.46,-1.751
  region: -2.74,-0.751 -2.44,-0.751 -2.44,-1.751 -2.74,-1.751
  lines w0.051: -2.74,-2.01 -2.74,-1.98 -2.74,0.92 -2.72,0.9 2.74,0.9 2.76,0.88 2.76,-2.02 -2.73,-2.01 -2.74,-2.01
3D body "CN1.stp": height 4.51, standoff 0, extent -3.05,-2.012 3.05,1.588

## CONN-SMD_A1002WV-S-6P [mm]
pads (8):
  rect 0.6x1.55 smd paste+0 mask+0.051: 1(2.499,1.251) 2(1.499,1.251) 3(0.501,1.249) 4(-0.501,1.251) 5(-1.501,1.251) 6(-2.501,1.251)
  rect 1.2x1.8 smd paste+0 mask+0.051: 7(3.201,-1.251) 8(-3.201,-1.251)
Top Overlay:
  lines w0.254: -4,0 -4,0.9 -3.24,0.9 ; -2.38,-2.02 2.38,-2.02 ; 3.241,0.911 4.001,0.911 4.001,0.011
Mechanical 15:
  region: -3.801,-0.6 -3.001,-0.6 -3.001,-2 -3.801,-2
  region: 3.001,-0.6 3.801,-0.6 3.801,-2 3.001,-2
  region: 2.399,1.6 2.599,1.6 2.599,0.85 2.399,0.85
  region: 1.399,1.6 1.599,1.6 1.599,0.85 1.399,0.85
  region: 0.401,1.6 0.601,1.6 0.601,0.85 0.401,0.85
  region: -0.601,1.6 -0.401,1.6 -0.401,0.85 -0.601,0.85
  region: -1.601,1.6 -1.401,1.6 -1.401,0.85 -1.601,0.85
  region: -2.601,1.6 -2.401,1.6 -2.401,0.85 -2.601,0.85
  region: -3.94,1.6 -3.94,1.625 -3.975,1.66 -4.025,1.66 -4.06,1.625 -4.06,1.6 -4.06,1.575 -4.025,1.54 -3.975,1.54 -3.94,1.575 -3.94,1.6
  lines w0.051: -4,-2 -4,0.9 4,0.9 4,-2 -4,-2
3D body "CN1.stp": height 4.51, standoff 0, extent -3.75,-2.112 3.75,1.488